# Altium schematic symbol library Chip.SchLib: 1 symbol
Pins are listed as number, name and electrical type; pins without a type are passive.

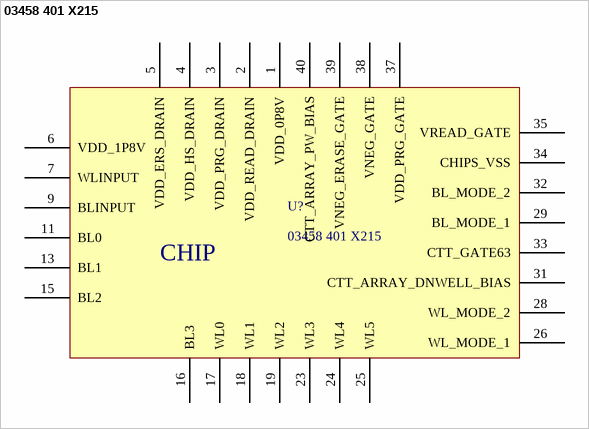
[diagram p0: symbol 03458 401 X215]

## 03458 401 X215
designator U?
40 Input/Output (I/O) and 1.02 Millimeter (mm) Pitch / Lead Chip Carrier (LCC) Socket with Castellations (live-bug load)
footprint 03458 401 X215
pins: 1 VDD_0P8V, 2 VDD_READ_DRAIN, 3 VDD_PRG_DRAIN, 4 VDD_HS_DRAIN, 5 VDD_ERS_DRAIN, 6 VDD_1P8V, 7 WLINPUT, 9 BLINPUT, 11 BL0, 13 BL1, 15 BL2, 16 BL3, 17 WL0, 18 WL1, 19 WL2, 23 WL3, 24 WL4, 25 WL5, 26 WL_MODE_1, 28 WL_MODE_2, 29 BL_MODE_1, 31 CTT_ARRAY_DNWELL_BIAS, 32 BL_MODE_2, 33 CTT_GATE63, 34 CHIPS_VSS, 35 VREAD_GATE, 37 VDD_PRG_GATE, 38 VNEG_GATE, 39 VNEG_ERASE_GATE, 40 CTT_ARRAY_PW_BIAS
text: CHIP